# Altium schematic symbol library 静电和浪涌保护_TPD4E1U06.SCHLIB: 1 symbol
Pins are listed as number, name and electrical type; pins without a type are passive.

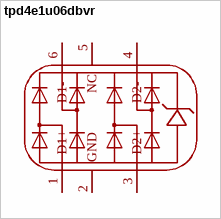
[diagram p0: symbol tpd4e1u06dbvr]

## tpd4e1u06dbvr
designator D??  (value not drawn)
极性:单向;反向截止电压(Vrwm):5.5V;钳位电压:15V;峰值脉冲电流(Ipp):3A@8/20us;峰值脉冲功率(Ppp):45W@8/20us;击穿电压:8.5V;; Manufacturer: TI(德州仪器); AddInBom: yes; ModelId: 18da8f6c14a34920b3e136b5c401a119; ModelName: SOT-23-6_L2.9-W1.6-H1.5-LS2.8-P0.95; ModelTransform: 110.73671,114.173,0,180,0,0,0.001,-0.003,0; Polarity: 单向; Reverse Stand-Off Voltage (Vrwm): 5.5V; Clamping Voltage: 15V; Voltage - Breakdown: 8.5V; Reverse Leakage Current (Ir): 10nA; Number of Channels: 四路; level of protection: IEC 61000-4-4；IEC 61000-4-5；IEC 61000-4-2; Type: TVS; Junction Capacitance: 0.8pF; Symbol: TPD4E1U06DBVR; LCSC Part Name: 单向ESD; SupplierPart: C124691; ManufacturerPart: TPD4E1U06DBVR; Supplier Footprint: SOT-23-6; JLCPCB Part Class: Extended Part; Datasheet: https://www.ti.com/cn/lit/gpn/tpd4e1u06; Supplier: LCSC; ConvertToPcb: yes; FootprintName: SOT-23-6_L2.9-W1.6-P0.95-LS2.8-BR; Peak Pulse Current (Ipp): 3A@8/20us; Peak Pulse Power Dissipation (Ppp): 45W@8/20us; Operating Temperature: -40℃~+125℃
footprint SOT-23-6_L2.9-W1.6-P0.95-LS2.8-BR
pins: 1 D1+, 2 GND, 3 D2+, 4 D2-, 5 NC, 6 D1-